# Altium schematic symbol library Nissan Leaf Waffle.SCHLIB: 16 symbols
Pins are listed as number, name and electrical type; pins without a type are passive.

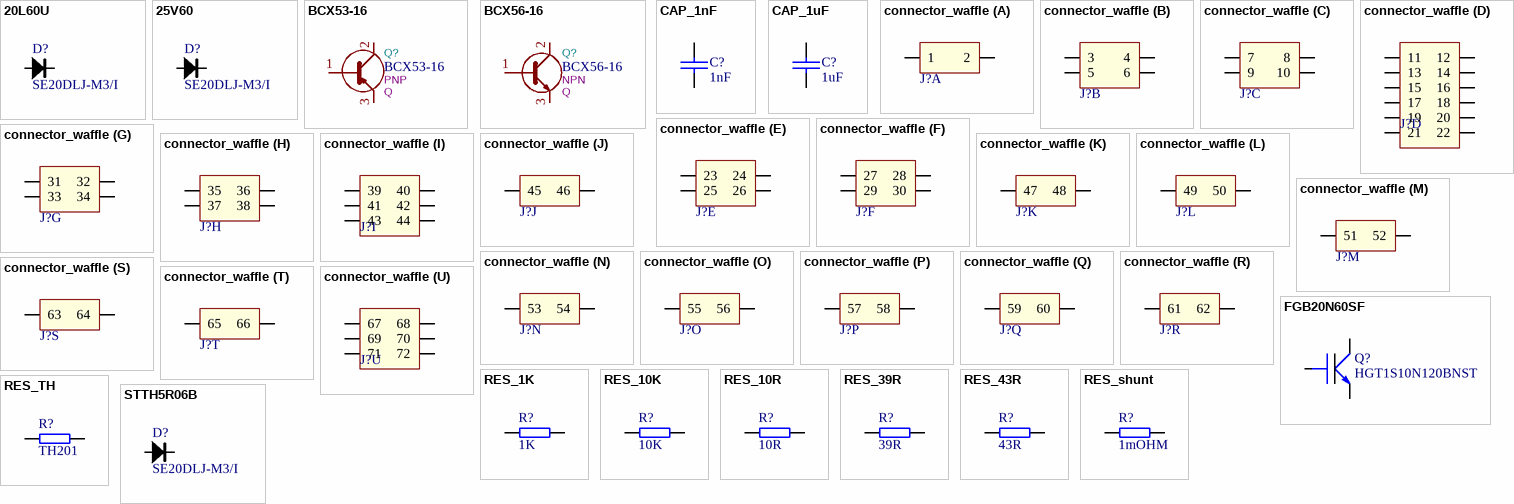
[diagram p0: symbols 20L60U to STTH5R06B]

## 20L60U
designator D?, comment SE20DLJ-M3/I
Diode rectifier 1V/1A/700V; Supplier 1: Mouser; Supplier Part Number 1: 78-VS-E5TX3012S2L-M3
simulation model 1N4007 (DIODE)
footprint D2PAK-D
footprint PG-TO252-3 - diode
pins: A, K

## 25V60
designator D?, comment SE20DLJ-M3/I
Diode rectifier 1V/1A/700V; Supplier 1: Digikey; Supplier Part Number 1: 112-VS-E5TX3012S2L-M3CT-ND; Supplier 2: Mouser; Supplier Part Number 2: 78-VS-E5TX3012S2L-M3
footprint 7227d
footprint SOD80
simulation model 1N4007 (DIODE)
footprint D2PAK-D
footprint PG-TO252-3 - diode
pins: A, K

## BCX53-16
designator Q?  value PNP  Reference: Q
BCX53-16   PNP; ki_keywords: NPN Bipolar Transistor; ki_description: Symbol for NPN BJT; Supplier 1: Mouser; Supplier Part Number 1: 726-BCX5316H6327XTSA
footprint SOT-89
pins: 1 B, 2 C, 3 E

## BCX56-16
designator Q?  value NPN  Reference: Q
BCX56-16 / NPN; ki_keywords: NPN Bipolar Transistor; ki_description: Symbol for NPN BJT; Supplier 1: Mouser; Supplier Part Number 1: 726-BCX5616H6327XTSA
footprint SOT-89
pins: 1 B, 2 C, 3 E

## CAP_1nF
designator C?, comment 1nF
CAPACITOR 1nF 1206; Voltage: 50V; Tolerance: 1-5%; Value: 1nF
footprint 1206
footprint 0603
footprint 0805
footprint SQCA
footprint 0603
footprint 0402 (Chip Capacitor, 2-Leads, Body 1.0x0.5mm, IPC Medium Density)
footprint 1210 (Chip Capacitor, 2-Leads, Body 3.2x2.5mm, IPC Medium Density)
footprint 1808 (Footprint 1808 Polarized)
footprint 1825 (Footprint 1825)
footprint 2220 (smd 2220  (5656metric))
footprint 1812 (Footprint 1812)
footprint HV_1812 (Footprint 1812)
footprint HV_2225 (Footprint 2225 for HV applications)
footprint HV_2220_C (smd 2220  (5650metric))
pins: 1, 2

## CAP_1uF
designator C?, comment 1uF
1206 1UF 50V; Tolerance: 1-5%; Voltage: 50V; Value: 1uF
footprint 1206
footprint 0603
footprint 0805
footprint SQCA
footprint 0603
footprint 0402 (Chip Capacitor, 2-Leads, Body 1.0x0.5mm, IPC Medium Density)
footprint 1210 (Chip Capacitor, 2-Leads, Body 3.2x2.5mm, IPC Medium Density)
footprint 1808 (Footprint 1808 Polarized)
footprint 1825 (Footprint 1825)
footprint 2220 (smd 2220  (5656metric))
footprint 1812 (Footprint 1812)
footprint HV_1812 (Footprint 1812)
footprint HV_2225 (Footprint 2225 for HV applications)
footprint HV_2220_C (smd 2220  (5650metric))
pins: 1, 2

## connector_waffle
designator J?  (value not drawn)
footprint waffle
part A pins: 1, 2
part B pins: 3, 4, 5, 6
part C pins: 7, 8, 9, 10
part D pins: 11, 12, 13, 14, 15, 16, 17, 18, 19, 20, 21, 22
part E pins: 23, 24, 25, 26
part F pins: 27, 28, 29, 30
part G pins: 31, 32, 33, 34
part H pins: 35, 36, 37, 38
part I pins: 39, 40, 41, 42, 43, 44
part J pins: 45, 46
part K pins: 47, 48
part L pins: 49, 50
part M pins: 51, 52
part N pins: 53, 54
part O pins: 55, 56
part P pins: 57, 58
part Q pins: 59, 60
part R pins: 61, 62
part S pins: 63, 64
part T pins: 65, 66
part U pins: 67, 68, 69, 70, 71, 72

## FGB20N60SF
designator Q?, comment HGT1S10N120BNST
HGT1S10N120BNST / IGBT N type 20A(40) 600V dpakpossible replacement STB27NM60ND / FGB20N60SF / RJP6012; Supplier 1: Rs; Supplier Part Number 1: 8076660P; Supplier 2: Mouser; Supplier Part Number 2: 512-HGT1S10N120BNST
footprint D2PAK
footprint PG-TO252-3
pins: 1 B, 2 E, 3 C

## RES_1K
designator R?, comment 1K
resistor 1k 1206; Power: 1/2W; Tolerance: 1%; Value: 1K
footprint 1206
footprint 0805
footprint 2512
footprint SOD80
footprint 0603
simulation model Model Name (Model Description)
footprint RESISTOR-9MM
footprint RESISTOR-12mm
footprint 2010 (Footprint 2010)
footprint Hv_2010 (Footprint 2010)
footprint 0402 (Footprint 0402)
footprint Model Name (Footprint not found)
footprint 1225
pins: 1, 2

## RES_10K
designator R?, comment 10K
resistor 10K 1206; Power: 1/2W; Tolerance: 1%; Value: 10K
footprint 1206
footprint 0805
footprint 2512
footprint SOD80
footprint 0603
simulation model Model Name (Model Description)
footprint RESISTOR-9MM
footprint RESISTOR-12mm
footprint 2010 (Footprint 2010)
footprint Hv_2010 (Footprint 2010)
footprint 0402 (Footprint 0402)
footprint Model Name (Footprint not found)
footprint 1225
pins: 1, 2

## RES_10R
designator R?, comment 10R
resistor; Power: 1/2W; Tolerance: 1%; Value: 10R
footprint 1206
footprint 0805
footprint 2512
footprint SOD80
footprint 0603
simulation model Model Name (Model Description)
footprint RESISTOR-9MM
footprint RESISTOR-12mm
footprint 2010 (Footprint 2010)
footprint Hv_2010 (Footprint 2010)
footprint 0402 (Footprint 0402)
footprint Model Name (Footprint not found)
footprint 1225
pins: 1, 2

## RES_39R
designator R?, comment 39R
resistor 39R 1206; Power: 1/2W; Tolerance: 1%; Value: 39R
footprint 1206
footprint 0805
footprint 2512
footprint SOD80
footprint 0603
simulation model Model Name (Model Description)
footprint RESISTOR-9MM
footprint RESISTOR-12mm
footprint 2010 (Footprint 2010)
footprint Hv_2010 (Footprint 2010)
footprint 0402 (Footprint 0402)
footprint Model Name (Footprint not found)
footprint 1225
pins: 1, 2

## RES_43R
designator R?, comment 43R
resistor 43R 1206; Power: 1/2W; Tolerance: 1%; Value: 43R
footprint 1206
footprint 0805
footprint 2512
footprint SOD80
footprint 0603
simulation model Model Name (Model Description)
footprint RESISTOR-9MM
footprint RESISTOR-12mm
footprint 2010 (Footprint 2010)
footprint Hv_2010 (Footprint 2010)
footprint 0402 (Footprint 0402)
footprint Model Name (Footprint not found)
footprint 1225
pins: 1, 2

## RES_shunt
designator R?, comment 1mOHM
resistor 1206 1mohm.; Power: 1/2W; Tolerance: 1%; Value: 1mOHM
footprint 1206
footprint 0805
footprint 2512
footprint SOD80
footprint 0603
simulation model Model Name (Model Description)
footprint RESISTOR-9MM
footprint RESISTOR-12mm
footprint 2010 (Footprint 2010)
footprint Hv_2010 (Footprint 2010)
footprint 0402 (Footprint 0402)
footprint Model Name (Footprint not found)
footprint 1225
pins: 1, 2

## RES_TH
designator R?, comment value TH201  (hidden comment: NB20N50104JBA)
NB20N50104JBA: resistor NTC 100K; Power: 1/2W; Tolerance: 1%
footprint 1206
footprint 0805
footprint 2512
footprint SOD80
footprint 0603
simulation model Model Name (Model Description)
footprint RESISTOR-9MM
footprint RESISTOR-12mm
footprint 2010 (Footprint 2010)
footprint Hv_2010 (Footprint 2010)
footprint 0402 (Footprint 0402)
footprint Model Name (Footprint not found)
footprint 1225
pins: 1, 2

## STTH5R06B
designator D?, comment SE20DLJ-M3/I
Supplier 1: Mouser; Supplier Part Number 1: 78-VS-E5TX3012S2L-M3
simulation model 1N4007 (DIODE)
footprint D2PAK-D
footprint PG-TO252-3 - diode
pins: A, K